# Altium schematic symbol library MC74AC125DR2.SchLib: 1 symbol
Pins are listed as number, name and electrical type; pins without a type are passive.

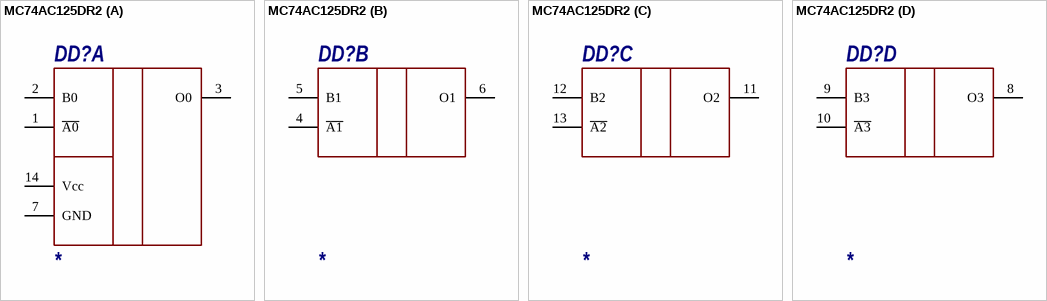
[diagram p0: symbol MC74AC125DR2]

## MC74AC125DR2
designator DD?
part A pins: 1 ~{A0}, 2 B0, 3 O0, 7 GND, 14 Vcc
part B pins: 4 ~{A1}, 5 B1, 6 O1
part C pins: 11 O2, 12 B2, 13 ~{A2}
part D pins: 8 O3, 9 B3, 10 ~{A3}